# Altium integrated library E73-2G4M08S1C.IntLib: 1 symbol
Pins are listed as number, name and electrical type; pins without a type are passive.

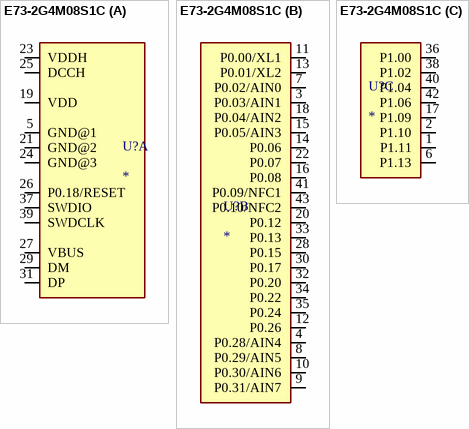
[diagram p0: symbol E73-2G4M08S1C]

## E73-2G4M08S1C
designator U?
nRF52840 2.4GHZ SMD Wireless Module; MF: EBYTE; MP: E73-2G4M08S1C; SnapEDA_Link: https://www.snapeda.com/parts/E73-2G4M08S1C/EBYTE/view-part/?ref=snap; Package: Package; Value: *; Check_prices: https://www.snapeda.com/parts/E73-2G4M08S1C/EBYTE/view-part/?ref=eda
footprint E73-2G4M08S1C
part A pins: 5 GND@1 (io), 19 VDD (io), 21 GND@2 (io), 23 VDDH (io), 24 GND@3 (io), 25 DCCH (io), 26 P0.18/RESET (io), 27 VBUS (io), 29 DM (io), 31 DP (io), 37 SWDIO (io), 39 SWDCLK (io)
part B pins: 3 P0.03/AIN1 (io), 4 P0.28/AIN4 (io), 7 P0.02/AIN0 (io), 8 P0.29/AIN5 (io), 9 P0.31/AIN7 (io), 10 P0.30/AIN6 (io), 11 P0.00/XL1 (io), 12 P0.26 (io), 13 P0.01/XL2 (io), 14 P0.06 (io), 15 P0.05/AIN3 (io), 16 P0.08 (io), 18 P0.04/AIN2 (io), 20 P0.12 (io), 22 P0.07 (io), 28 P0.15 (io), 30 P0.17 (io), 32 P0.20 (io), 33 P0.13 (io), 34 P0.22 (io), 35 P0.24 (io), 41 P0.09/NFC1 (io), 43 P0.10/NFC2 (io)
part C pins: 1 P1.11 (io), 2 P1.10 (io), 6 P1.13 (io), 17 P1.09 (io), 36 P1.00 (io), 38 P1.02 (io), 40 P1.04 (io), 42 P1.06 (io)